# Altium footprint library PcbLib1.PcbLib: 335 footprints (part 20 of 22)
Each footprint in its own frame and in the unit in brackets; x right, y up, seen from the top. Pads: shape width x height; smd on the part's side, far side on the other; paste and mask are expansions set on the pad; w line width, h text height; cw(c..) or ccw(c..) is an arc to the next point about the centre after c.
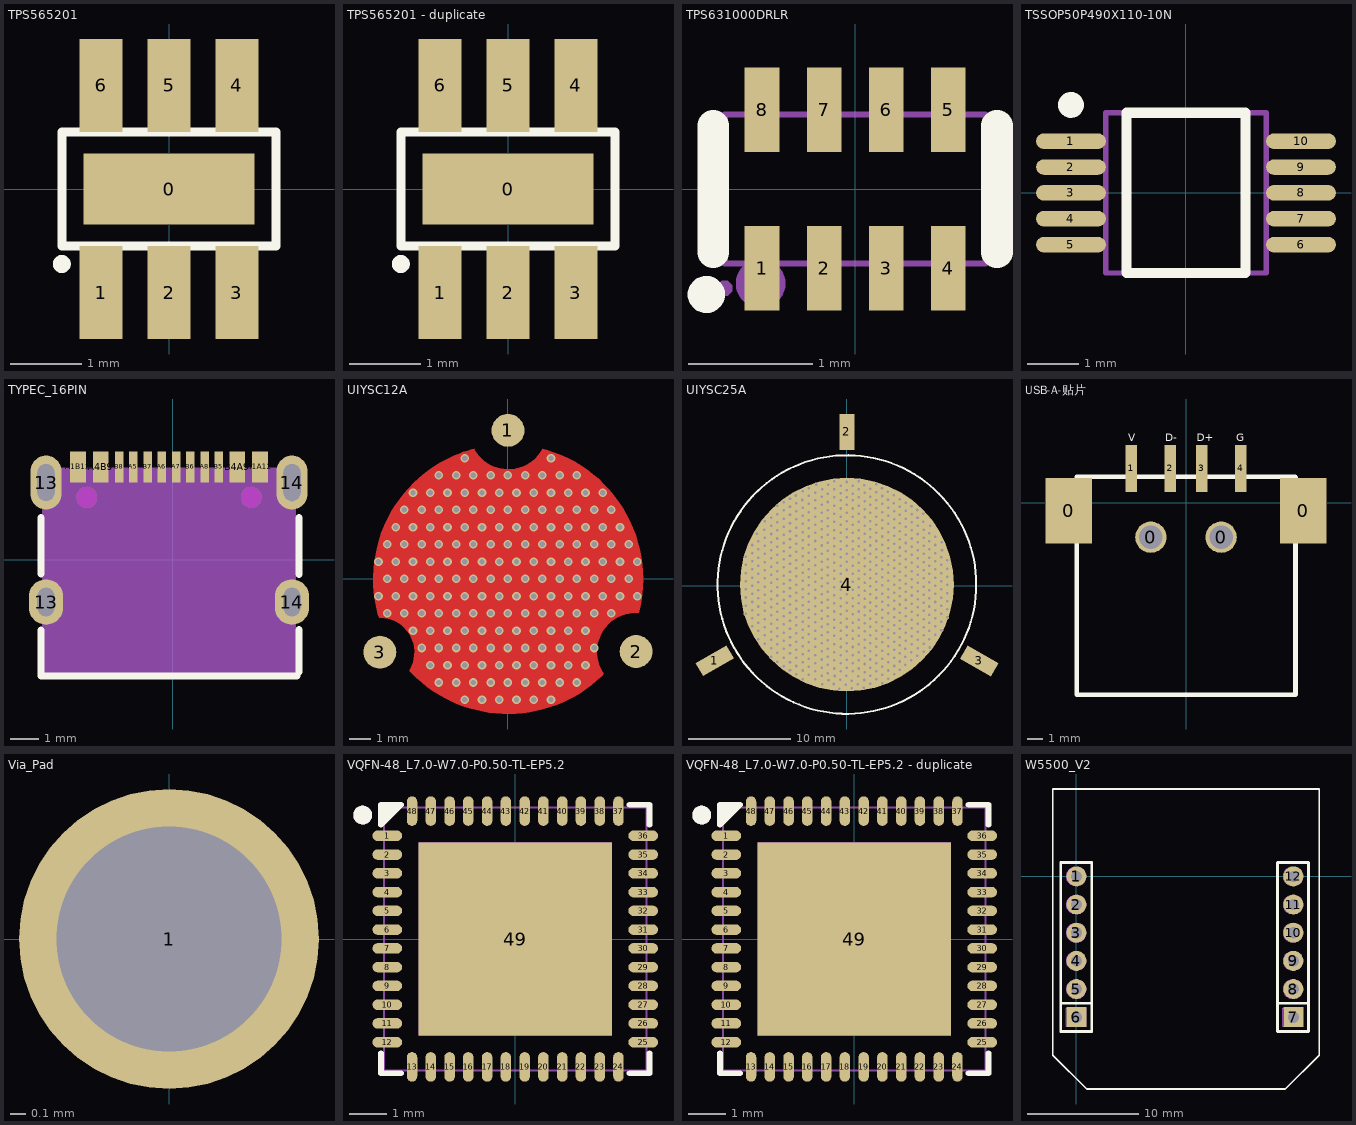
[diagram p19: the footprints below, top view; thin cyan lines are the x and y axes]

## TPS565201 [mm]
height 0.9
pads (7):
  rect 2.4x1 smd: 0(0,0)
  rect 0.6x1.3 smd: 1(-0.95,-1.45) 2(0,-1.45) 3(0.95,-1.45) 4(0.95,1.45) 5(0,1.45) 6(-0.95,1.45)
Top Overlay:
  circle w0.15: c-1.5,-1.05 r0.05
  lines w0.127: -1.5,-0.8 -1.5,0.8 1.5,0.8 1.5,-0.8 -1.5,-0.8

## TPS565201 - duplicate [mm]
height 0.9
pads (7):
  rect 2.4x1 smd: 0(0,0)
  rect 0.6x1.3 smd: 1(-0.95,-1.45) 2(0,-1.45) 3(0.95,-1.45) 4(0.95,1.45) 5(0,1.45) 6(-0.95,1.45)
Top Overlay:
  circle w0.15: c-1.5,-1.05 r0.05
  lines w0.127: -1.5,-0.8 -1.5,0.8 1.5,0.8 1.5,-0.8 -1.5,-0.8

## TPS631000DRLR [mm] "升降压DCDC"
pads (8):
  rect 0.28x0.68 smd: 1(-0.75,-0.64) 2(-0.25,-0.64) 3(0.25,-0.64) 4(0.75,-0.64) 5(0.75,0.64) 6(0.25,0.64) 7(-0.25,0.64) 8(-0.75,0.64)
Top Overlay:
  circle w0.15: c-1.2,-0.85 r0.075
  lines w0.254: -1.143,-0.508 -1.143,0.508 ; 1.143,-0.508 1.143,0.508
Mechanical 2:
  circle w0.2: c-0.762,-0.762 r0.1
Mechanical 6:
  lines w0.051: -1.05,-0.6 -1.05,0.6 1.05,0.6 1.05,-0.6 -1.05,-0.6
Mechanical 8:
  region: -0.99,-0.8 -0.99,-0.825 -1.025,-0.86 -1.075,-0.86 -1.11,-0.825 -1.11,-0.8 -1.11,-0.775 -1.075,-0.74 -1.025,-0.74 -0.99,-0.775 -0.99,-0.8
Mechanical 9:
  region: -0.64,-0.8 -0.64,-0.5 -0.86,-0.5 -0.86,-0.8
  region: -0.14,-0.8 -0.14,-0.5 -0.36,-0.5 -0.36,-0.8
  region: 0.36,-0.8 0.36,-0.5 0.14,-0.5 0.14,-0.8
  region: 0.86,-0.8 0.86,-0.5 0.64,-0.5 0.64,-0.8
  region: 0.86,0.8 0.86,0.5 0.64,0.5 0.64,0.8
  region: 0.36,0.8 0.36,0.5 0.14,0.5 0.14,0.8
  region: -0.14,0.8 -0.14,0.5 -0.36,0.5 -0.36,0.8
  region: -0.64,0.8 -0.64,0.5 -0.86,0.5 -0.86,0.8

## TSSOP50P490X110-10N [mm] "TSSOP, 10-Leads, Body 3.00x3.00mm, Pitch 0.50mm, IPC Medium Density"
height 1.1
pads (10):
  oval 1.35x0.3 smd: 1(-2.225,1) 2(-2.225,0.5) 3(-2.225,0) 4(-2.225,-0.5) 5(-2.225,-1) 6(2.225,-1) 7(2.225,-0.5) 8(2.225,0) 9(2.225,0.5) 10(2.225,1)
Top Overlay:
  circle w0.25: c-2.225,1.7 r0.125
  lines w0.2: -1.15,-1.55 1.15,-1.55 1.15,1.55 -1.15,1.55 -1.15,-1.55
Mechanical 13:
  lines w0.1: -1.55,-1.55 1.55,-1.55 1.55,1.55 -1.55,1.55 -1.55,-1.55
3D body: height 1.1, standoff 0.05, extent -1.55,-1.55 1.55,1.55

## TYPEC_16PIN [mm]
pads (16):
  oval 1.2x1.6 hole 0.6 slot 1 at 90 deg paste-2539.97 mask+0.05: 13(-4.452,-1.486) 14(4.198,-1.486)
  oval 1.1x1.9 hole 0.6 slot 1.3 at 90 deg paste-2539.97 mask+0.05: 13(-4.452,2.714) 14(4.198,2.714)
  rect 0.55x1.1 smd paste+0 mask+0.05: A1B12(-3.327,3.264) A4B9(-2.527,3.264) B1A12(3.073,3.264) B4A9(2.273,3.264)
  rect 0.3x1.1 smd paste+0 mask+0.05: A5(-1.377,3.264) A6(-0.377,3.264) A7(0.123,3.264) A8(1.123,3.264) B5(1.623,3.264) B6(0.623,3.264) B7(-0.877,3.264) B8(-1.877,3.264)
Top Overlay:
  lines w0.254: -4.627,-2.467 -4.627,-4.086 4.373,-4.086 ; -4.627,-0.505 -4.627,1.483 ; 4.445,-3.937 4.445,-2.464 ; 4.445,-0.508 4.445,1.486
Keep-Out Layer:
  board cut-out: 3.113,2.194 3.113,2.124 3.06,1.996 2.961,1.897 2.833,1.844 2.694,1.844 2.565,1.897 2.466,1.996 2.413,2.124 2.413,2.194 2.413,2.264 2.466,2.392 2.565,2.491 2.694,2.544 2.833,2.544 2.961,2.491 3.06,2.392 3.113,2.264 3.113,2.194
  board cut-out: -2.667,2.194 -2.667,2.124 -2.72,1.996 -2.819,1.897 -2.947,1.844 -3.087,1.844 -3.215,1.897 -3.314,1.996 -3.367,2.124 -3.367,2.194 -3.367,2.264 -3.314,2.392 -3.215,2.491 -3.087,2.544 -2.947,2.544 -2.819,2.491 -2.72,2.392 -2.667,2.264 -2.667,2.194
Keep-Out Layer:
  circle w0.003: c2.763,2.194 r0.35
  circle w0.003: c-3.017,2.194 r0.35
  region: 3.113,2.194 3.104,2.116 3.078,2.042 3.037,1.976 2.981,1.92 2.915,1.879 2.841,1.853 2.763,1.844 2.685,1.853 2.611,1.879 2.545,1.92 2.489,1.976 2.448,2.042 2.422,2.116 2.413,2.194 2.422,2.272 2.448,2.346 2.489,2.412 2.545,2.468 2.611,2.509 2.685,2.535 2.763,2.544 2.841,2.535 2.915,2.509 2.981,2.468 3.037,2.412 3.078,2.346 3.104,2.272
  region: 3.113,2.194 3.113,2.124 3.06,1.996 2.961,1.897 2.833,1.844 2.694,1.844 2.565,1.897 2.466,1.996 2.413,2.124 2.413,2.194 2.413,2.264 2.466,2.392 2.565,2.491 2.694,2.544 2.833,2.544 2.961,2.491 3.06,2.392 3.113,2.264 3.113,2.194
  region: -2.667,2.194 -2.676,2.116 -2.702,2.042 -2.743,1.976 -2.799,1.92 -2.865,1.879 -2.939,1.853 -3.017,1.844 -3.095,1.853 -3.169,1.879 -3.235,1.92 -3.291,1.976 -3.332,2.042 -3.358,2.116 -3.367,2.194 -3.358,2.272 -3.332,2.346 -3.291,2.412 -3.235,2.468 -3.169,2.509 -3.095,2.535 -3.017,2.544 -2.939,2.535 -2.865,2.509 -2.799,2.468 -2.743,2.412 -2.702,2.346 -2.676,2.272
  region: -2.667,2.194 -2.667,2.124 -2.72,1.996 -2.819,1.897 -2.947,1.844 -3.087,1.844 -3.215,1.897 -3.314,1.996 -3.367,2.124 -3.367,2.194 -3.367,2.264 -3.314,2.392 -3.215,2.491 -3.087,2.544 -2.947,2.544 -2.819,2.491 -2.72,2.392 -2.667,2.264 -2.667,2.194
Mechanical 1:
  circle w0.003: c2.763,2.194 r0.35
  circle w0.003: c-3.017,2.194 r0.35
Mechanical 5:
  circle w0.25: c2.763,2.194 r0.125
  circle w0.25: c-3.017,2.194 r0.125
Mechanical 9:
  region: -4.577,-4.112 -4.577,3.238 4.323,3.238 4.323,-4.112
Mechanical 11:
  region: -4.547,3.538 -4.547,3.526 -4.565,3.508 -4.589,3.508 -4.607,3.526 -4.607,3.538 -4.607,3.551 -4.589,3.568 -4.565,3.568 -4.547,3.551 -4.547,3.538
Mechanical 12:
  region: -4.602,-1.086 -4.302,-1.086 -4.302,-1.886 -4.602,-1.886
  region: 4.048,-1.086 4.348,-1.086 4.348,-1.886 4.048,-1.886
  region: 4.048,3.264 4.348,3.264 4.348,2.164 4.048,2.164
  region: -4.577,3.238 -4.327,3.238 -4.327,2.138 -4.577,2.138
  region: 2.873,3.538 3.273,3.538 3.273,2.688 2.873,2.688
  region: 2.073,3.538 2.473,3.538 2.473,2.688 2.073,2.688
  region: -2.727,3.538 -2.327,3.538 -2.327,2.688 -2.727,2.688
  region: -3.527,3.538 -3.127,3.538 -3.127,2.688 -3.527,2.688
  region: 1.523,3.538 1.723,3.538 1.723,2.688 1.523,2.688
  region: 1.023,3.538 1.223,3.538 1.223,2.688 1.023,2.688
  region: 0.523,3.538 0.723,3.538 0.723,2.688 0.523,2.688
  region: 0.023,3.538 0.223,3.538 0.223,2.688 0.023,2.688
  region: -0.477,3.538 -0.277,3.538 -0.277,2.688 -0.477,2.688
  region: -1.477,3.538 -1.277,3.538 -1.277,2.688 -1.477,2.688
  region: -0.977,3.538 -0.777,3.538 -0.777,2.688 -0.977,2.688
  region: -1.977,3.538 -1.777,3.538 -1.777,2.688 -1.977,2.688

## UIYSC12A [mil] "环行器"
pads (4):
  round 60 smd: 1(0.24,271) 2(234.04,-132.51) 3(-233.56,-133.71)
  round 1 smd: 4(0,0)
via 173.23,157.48 diameter 15.75 hole 9.84
via -78.74,220.47 diameter 15.75 hole 9.84
via 94.49,188.98 diameter 15.75 hole 9.84
via 62.99,188.98 diameter 15.75 hole 9.84
via -125.98,188.98 diameter 15.75 hole 9.84
via -94.49,188.98 diameter 15.75 hole 9.84
via -62.99,188.98 diameter 15.75 hole 9.84
via -31.5,188.98 diameter 15.75 hole 9.84
via 125.98,188.98 diameter 15.75 hole 9.84
via 78.74,220.47 diameter 15.75 hole 9.84
via 31.5,188.98 diameter 15.75 hole 9.84
via 0,188.98 diameter 15.75 hole 9.84
via 78.74,-220.47 diameter 15.75 hole 9.84
via -78.74,-220.47 diameter 15.75 hole 9.84
via -47.24,-220.47 diameter 15.75 hole 9.84
via -15.75,-220.47 diameter 15.75 hole 9.84
via 47.24,-220.47 diameter 15.75 hole 9.84
via 15.75,-220.47 diameter 15.75 hole 9.84
via -125.98,-188.98 diameter 15.75 hole 9.84
via -94.49,-188.98 diameter 15.75 hole 9.84
via -62.99,-188.98 diameter 15.75 hole 9.84
via -31.5,-188.98 diameter 15.75 hole 9.84
via 125.98,-188.98 diameter 15.75 hole 9.84
via 110.24,-157.48 diameter 15.75 hole 9.84
via 78.74,-157.48 diameter 15.75 hole 9.84
via 31.5,-188.98 diameter 15.75 hole 9.84
via 0,-188.98 diameter 15.75 hole 9.84
via -141.73,-157.48 diameter 15.75 hole 9.84
via -110.24,-157.48 diameter 15.75 hole 9.84
via -78.74,-157.48 diameter 15.75 hole 9.84
via -47.24,-157.48 diameter 15.75 hole 9.84
via -15.75,-157.48 diameter 15.75 hole 9.84
via 141.73,-157.48 diameter 15.75 hole 9.84
via 94.49,-188.98 diameter 15.75 hole 9.84
via 62.99,-188.98 diameter 15.75 hole 9.84
via 47.24,-157.48 diameter 15.75 hole 9.84
via 15.75,-157.48 diameter 15.75 hole 9.84
via 94.49,-125.98 diameter 15.75 hole 9.84
via 62.99,-125.98 diameter 15.75 hole 9.84
via -157.48,-125.98 diameter 15.75 hole 9.84
via -125.98,-125.98 diameter 15.75 hole 9.84
via -94.49,-125.98 diameter 15.75 hole 9.84
via -62.99,-125.98 diameter 15.75 hole 9.84
via -31.5,-125.98 diameter 15.75 hole 9.84
via 157.48,-125.98 diameter 15.75 hole 9.84
via 125.98,-125.98 diameter 15.75 hole 9.84
via 31.5,-125.98 diameter 15.75 hole 9.84
via 0,-125.98 diameter 15.75 hole 9.84
via -220.47,-62.99 diameter 15.75 hole 9.84
via -188.98,-62.99 diameter 15.75 hole 9.84
via -173.23,-94.49 diameter 15.75 hole 9.84
via -141.73,-94.49 diameter 15.75 hole 9.84
via -110.24,-94.49 diameter 15.75 hole 9.84
via -78.74,-94.49 diameter 15.75 hole 9.84
via -47.24,-94.49 diameter 15.75 hole 9.84
via 188.98,-62.99 diameter 15.75 hole 9.84
via 141.73,-94.49 diameter 15.75 hole 9.84
via 110.24,-94.49 diameter 15.75 hole 9.84
via 94.49,-62.99 diameter 15.75 hole 9.84
via 62.99,-62.99 diameter 15.75 hole 9.84
via 15.75,-94.49 diameter 15.75 hole 9.84
via -15.75,-94.49 diameter 15.75 hole 9.84
via -157.48,-62.99 diameter 15.75 hole 9.84
via -125.98,-62.99 diameter 15.75 hole 9.84
via -94.49,-62.99 diameter 15.75 hole 9.84
via -62.99,-62.99 diameter 15.75 hole 9.84
via -31.5,-62.99 diameter 15.75 hole 9.84
via 157.48,-62.99 diameter 15.75 hole 9.84
via 125.98,-62.99 diameter 15.75 hole 9.84
via 78.74,-94.49 diameter 15.75 hole 9.84
via 47.24,-94.49 diameter 15.75 hole 9.84
via 31.5,-62.99 diameter 15.75 hole 9.84
via 0,-62.99 diameter 15.75 hole 9.84
via -173.23,157.48 diameter 15.75 hole 9.84
via 110.24,157.48 diameter 15.75 hole 9.84
via 78.74,157.48 diameter 15.75 hole 9.84
via -141.73,157.48 diameter 15.75 hole 9.84
via -110.24,157.48 diameter 15.75 hole 9.84
via -78.74,157.48 diameter 15.75 hole 9.84
via -47.24,157.48 diameter 15.75 hole 9.84
via -15.75,157.48 diameter 15.75 hole 9.84
via 141.73,157.48 diameter 15.75 hole 9.84
via 47.24,157.48 diameter 15.75 hole 9.84
via 15.75,157.48 diameter 15.75 hole 9.84
via -204.72,94.49 diameter 15.75 hole 9.84
via -173.23,94.49 diameter 15.75 hole 9.84
via -157.48,125.98 diameter 15.75 hole 9.84
via -125.98,125.98 diameter 15.75 hole 9.84
via -94.49,125.98 diameter 15.75 hole 9.84
via -62.99,125.98 diameter 15.75 hole 9.84
via -31.5,125.98 diameter 15.75 hole 9.84
via 204.72,94.49 diameter 15.75 hole 9.84
via 157.48,125.98 diameter 15.75 hole 9.84
via 125.98,125.98 diameter 15.75 hole 9.84
via 110.24,94.49 diameter 15.75 hole 9.84
via 78.74,94.49 diameter 15.75 hole 9.84
via 31.5,125.98 diameter 15.75 hole 9.84
via 0,125.98 diameter 15.75 hole 9.84
via -188.98,125.98 diameter 15.75 hole 9.84
via -141.73,94.49 diameter 15.75 hole 9.84
via -110.24,94.49 diameter 15.75 hole 9.84
via -78.74,94.49 diameter 15.75 hole 9.84
via -47.24,94.49 diameter 15.75 hole 9.84
via -15.75,94.49 diameter 15.75 hole 9.84
via 188.98,125.98 diameter 15.75 hole 9.84
via 173.23,94.49 diameter 15.75 hole 9.84
via 141.73,94.49 diameter 15.75 hole 9.84
via 94.49,125.98 diameter 15.75 hole 9.84
via 62.99,125.98 diameter 15.75 hole 9.84
via 47.24,94.49 diameter 15.75 hole 9.84
via 15.75,94.49 diameter 15.75 hole 9.84
via -157.48,62.99 diameter 15.75 hole 9.84
via -125.98,62.99 diameter 15.75 hole 9.84
via -94.49,62.99 diameter 15.75 hole 9.84
via -62.99,62.99 diameter 15.75 hole 9.84
via -31.5,62.99 diameter 15.75 hole 9.84
via 157.48,62.99 diameter 15.75 hole 9.84
via 125.98,62.99 diameter 15.75 hole 9.84
via 31.5,62.99 diameter 15.75 hole 9.84
via 0,62.99 diameter 15.75 hole 9.84
via -220.47,62.99 diameter 15.75 hole 9.84
via -188.98,62.99 diameter 15.75 hole 9.84
via 220.47,62.99 diameter 15.75 hole 9.84
via 188.98,62.99 diameter 15.75 hole 9.84
via 94.49,62.99 diameter 15.75 hole 9.84
via 62.99,62.99 diameter 15.75 hole 9.84
via -236.22,-31.5 diameter 15.75 hole 9.84
via -204.72,-31.5 diameter 15.75 hole 9.84
via -173.23,-31.5 diameter 15.75 hole 9.84
via 236.22,-31.5 diameter 15.75 hole 9.84
via 204.72,-31.5 diameter 15.75 hole 9.84
via 110.24,-31.5 diameter 15.75 hole 9.84
via 78.74,-31.5 diameter 15.75 hole 9.84
via -141.73,-31.5 diameter 15.75 hole 9.84
via -110.24,-31.5 diameter 15.75 hole 9.84
via -78.74,-31.5 diameter 15.75 hole 9.84
via -47.24,-31.5 diameter 15.75 hole 9.84
via -15.75,-31.5 diameter 15.75 hole 9.84
via 173.23,-31.5 diameter 15.75 hole 9.84
via 141.73,-31.5 diameter 15.75 hole 9.84
via 47.24,-31.5 diameter 15.75 hole 9.84
via 15.75,-31.5 diameter 15.75 hole 9.84
via -236.22,31.5 diameter 15.75 hole 9.84
via -204.72,31.5 diameter 15.75 hole 9.84
via -173.23,31.5 diameter 15.75 hole 9.84
via -157.48,0 diameter 15.75 hole 9.84
via -125.98,0 diameter 15.75 hole 9.84
via -94.49,0 diameter 15.75 hole 9.84
via -62.99,0 diameter 15.75 hole 9.84
via -31.5,0 diameter 15.75 hole 9.84
via 236.22,31.5 diameter 15.75 hole 9.84
via 204.72,31.5 diameter 15.75 hole 9.84
via 157.48,0 diameter 15.75 hole 9.84
via 125.98,0 diameter 15.75 hole 9.84
via 110.24,31.5 diameter 15.75 hole 9.84
via 78.74,31.5 diameter 15.75 hole 9.84
via 31.5,0 diameter 15.75 hole 9.84
via 0,0 diameter 15.75 hole 9.84
via -220.47,0 diameter 15.75 hole 9.84
via -188.98,0 diameter 15.75 hole 9.84
via -141.73,31.5 diameter 15.75 hole 9.84
via -110.24,31.5 diameter 15.75 hole 9.84
via -78.74,31.5 diameter 15.75 hole 9.84
via -47.24,31.5 diameter 15.75 hole 9.84
via -15.75,31.5 diameter 15.75 hole 9.84
via 220.47,0 diameter 15.75 hole 9.84
via 188.98,0 diameter 15.75 hole 9.84
via 173.23,31.5 diameter 15.75 hole 9.84
via 141.73,31.5 diameter 15.75 hole 9.84
via 94.49,0 diameter 15.75 hole 9.84
via 62.99,0 diameter 15.75 hole 9.84
via 47.24,31.5 diameter 15.75 hole 9.84
via 15.75,31.5 diameter 15.75 hole 9.84
Top Layer:
  region: 188 vertices and 0 holes, not listed, extent -245.61,-246.46 246.71,237.74
Top Paste:
  drawing of 1 lines, arcs and shapes, not listed
Top Solder:
  region: 26.42,285.58 27.87,283.06 29.74,277.55 30.5,271.78 30.12,265.98 28.61,260.36 26.04,255.14 22.5,250.53 18.13,246.69 15.61,245.24 13.09,243.79 7.58,241.92 1.82,241.16 -3.99,241.54 -9.61,243.04 -14.82,245.62 -19.44,249.16 -23.27,253.53 -24.73,256.05 -26.18,258.57 -28.05,264.07 -28.81,269.84 -28.43,275.64 -26.92,281.26 -24.35,286.48 -20.81,291.09 -16.44,294.93 -13.92,296.38 -11.4,297.84 -5.89,299.71 -0.13,300.47 5.68,300.09 11.3,298.58 16.51,296.01 21.13,292.47 24.96,288.09
  region: -207.66,-119.15 -206.2,-121.67 -204.33,-127.18 -203.57,-132.94 -203.96,-138.75 -205.46,-144.36 -208.03,-149.58 -211.57,-154.2 -215.95,-158.03 -218.47,-159.49 -220.98,-160.94 -226.49,-162.81 -232.26,-163.57 -238.06,-163.19 -243.68,-161.68 -248.9,-159.11 -253.51,-155.57 -257.35,-151.2 -258.8,-148.68 -260.26,-146.16 -262.12,-140.65 -262.88,-134.88 -262.5,-129.08 -261,-123.46 -258.43,-118.25 -254.88,-113.63 -250.51,-109.8 -247.99,-108.34 -245.47,-106.89 -239.97,-105.02 -234.2,-104.26 -228.4,-104.64 -222.78,-106.14 -217.56,-108.72 -212.95,-112.26 -209.11,-116.63
  region: 259.29,-117.77 260.74,-120.29 262.61,-125.8 263.37,-131.57 262.99,-137.37 261.49,-142.99 258.92,-148.21 255.37,-152.82 251,-156.66 248.48,-158.11 245.96,-159.56 240.46,-161.43 234.69,-162.19 228.89,-161.81 223.27,-160.31 218.05,-157.73 213.44,-154.19 209.6,-149.82 208.15,-147.3 206.69,-144.78 204.82,-139.28 204.06,-133.51 204.44,-127.7 205.95,-122.09 208.52,-116.87 212.06,-112.26 216.44,-108.42 218.96,-106.97 221.47,-105.51 226.98,-103.64 232.75,-102.88 238.55,-103.26 244.17,-104.77 249.39,-107.34 254,-110.88 257.84,-115.26

## UIYSC25A [mm] "环行器"
pads (4):
  rect 1.5x3.5 smd rot 120: 1(-12.97,-7.392)
  rect 1.5x3.5 smd: 2(0.007,15.085)
  rect 1.5x3.5 smd rot 60: 3(12.997,-7.4)
  round 21 smd mask+0: 4(0.007,0.1)
via 1.146,10.234 diameter 0.4 hole 0.25
via 2.871,9.936 diameter 0.4 hole 0.25
via 1.725,9.874 diameter 0.4 hole 0.25
via 0.579,9.813 diameter 0.4 hole 0.25
via -1.242,10.254 diameter 0.4 hole 0.25
via 0,10.172 diameter 0.4 hole 0.25
via -3.029,9.911 diameter 0.4 hole 0.25
via -1.827,9.893 diameter 0.4 hole 0.25
via -0.621,9.813 diameter 0.4 hole 0.25
via -5.586,8.54 diameter 0.4 hole 0.25
via -5.006,8.847 diameter 0.4 hole 0.25
via 1.661,-10.049 diameter 0.4 hole 0.25
via 0.463,-10.102 diameter 0.4 hole 0.25
via -0.734,-10.155 diameter 0.4 hole 0.25
via 6.347,7.781 diameter 0.4 hole 0.25
via 6.927,7.422 diameter 0.4 hole 0.25
via -9.931,-2.774 diameter 0.4 hole 0.25
via -9.931,-1.974 diameter 0.4 hole 0.25
via -9.931,-1.174 diameter 0.4 hole 0.25
via -9.931,-0.374 diameter 0.4 hole 0.25
via -9.931,0.426 diameter 0.4 hole 0.25
via -8.852,5.086 diameter 0.4 hole 0.25
via -8.069,6.303 diameter 0.4 hole 0.25
via -7.448,6.663 diameter 0.4 hole 0.25
via -6.828,7.822 diameter 0.4 hole 0.25
via -6.828,7.022 diameter 0.4 hole 0.25
via -6.207,8.181 diameter 0.4 hole 0.25
via -9.931,1.226 diameter 0.4 hole 0.25
via -9.931,2.026 diameter 0.4 hole 0.25
via -9.931,2.826 diameter 0.4 hole 0.25
via -5.584,-8.313 diameter 0.4 hole 0.25
via -4.966,-8.701 diameter 0.4 hole 0.25
via -6.201,-7.926 diameter 0.4 hole 0.25
via -6.822,-7.485 diameter 0.4 hole 0.25
via -8.69,-5.256 diameter 0.4 hole 0.25
via -8.069,-5.697 diameter 0.4 hole 0.25
via -7.446,-6.991 diameter 0.4 hole 0.25
via 9.848,-2.333 diameter 0.4 hole 0.25
via 9.848,2.467 diameter 0.4 hole 0.25
via 9.848,-0.733 diameter 0.4 hole 0.25
via 9.848,0.067 diameter 0.4 hole 0.25
via 9.848,0.867 diameter 0.4 hole 0.25
via 9.848,1.667 diameter 0.4 hole 0.25
via 9.848,-1.533 diameter 0.4 hole 0.25
via 9.848,-3.133 diameter 0.4 hole 0.25
via 8.174,5.877 diameter 0.4 hole 0.25
via 7.506,7.063 diameter 0.4 hole 0.25
via 5.768,8.14 diameter 0.4 hole 0.25
via 6.334,-7.35 diameter 0.4 hole 0.25
via 2.278,-9.636 diameter 0.4 hole 0.25
via 8.149,-6.084 diameter 0.4 hole 0.25
via 9.269,-4.374 diameter 0.4 hole 0.25
via 6.913,-6.909 diameter 0.4 hole 0.25
via 7.531,-6.497 diameter 0.4 hole 0.25
via -2.42,-9.71 diameter 0.4 hole 0.25
via -1.275,-9.671 diameter 0.4 hole 0.25
via 1.081,-9.689 diameter 0.4 hole 0.25
via -0.116,-9.743 diameter 0.4 hole 0.25
via 2.317,-7.264 diameter 0.4 hole 0.25
via 7.519,6.283 diameter 0.4 hole 0.25
via 7.531,5.503 diameter 0.4 hole 0.25
via 9.335,4.244 diameter 0.4 hole 0.25
via 9.344,3.483 diameter 0.4 hole 0.25
via 9.292,2.773 diameter 0.4 hole 0.25
via 9.269,2.026 diameter 0.4 hole 0.25
via 9.269,1.226 diameter 0.4 hole 0.25
via 9.269,0.426 diameter 0.4 hole 0.25
via 9.269,-0.374 diameter 0.4 hole 0.25
via 9.277,-1.179 diameter 0.4 hole 0.25
via 9.269,-1.974 diameter 0.4 hole 0.25
via 7.531,0.703 diameter 0.4 hole 0.25
via 8.69,-2.415 diameter 0.4 hole 0.25
via 6.36,7.001 diameter 0.4 hole 0.25
via 5.793,6.581 diameter 0.4 hole 0.25
via 5.781,7.36 diameter 0.4 hole 0.25
via 5.214,6.94 diameter 0.4 hole 0.25
via 5.201,7.72 diameter 0.4 hole 0.25
via 2.896,1.977 diameter 0.4 hole 0.25
via 5.214,-2.66 diameter 0.4 hole 0.25
via 5.214,-1.86 diameter 0.4 hole 0.25
via 1.738,5.095 diameter 0.4 hole 0.25
via 4.634,-4.701 diameter 0.4 hole 0.25
via 4.634,-0.701 diameter 0.4 hole 0.25
via 1.738,6.695 diameter 0.4 hole 0.25
via 2.896,2.777 diameter 0.4 hole 0.25
via 4.634,-5.501 diameter 0.4 hole 0.25
via 5.214,-1.06 diameter 0.4 hole 0.25
via 1.738,5.895 diameter 0.4 hole 0.25
via 2.317,2.336 diameter 0.4 hole 0.25
via 1.158,-8.146 diameter 0.4 hole 0.25
via -0.621,1.967 diameter 0.4 hole 0.25
via 6.952,-0.537 diameter 0.4 hole 0.25
via 2.317,-5.664 diameter 0.4 hole 0.25
via 1.158,2.254 diameter 0.4 hole 0.25
via 1.738,-4.505 diameter 0.4 hole 0.25
via 2.896,-2.823 diameter 0.4 hole 0.25
via 1.158,-0.146 diameter 0.4 hole 0.25
via 4.055,3.658 diameter 0.4 hole 0.25
via 1.738,-3.705 diameter 0.4 hole 0.25
via 2.317,-2.464 diameter 0.4 hole 0.25
via 4.055,5.258 diameter 0.4 hole 0.25
via 8.69,3.985 diameter 0.4 hole 0.25
via 0.579,-2.833 diameter 0.4 hole 0.25
via 0.579,0.367 diameter 0.4 hole 0.25
via -4.345,7.658 diameter 0.4 hole 0.25
via 0.001,7.93 diameter 0.4 hole 0.25
via 8.11,5.144 diameter 0.4 hole 0.25
via 1.158,-3.346 diameter 0.4 hole 0.25
via 1.158,0.654 diameter 0.4 hole 0.25
via -4.345,6.858 diameter 0.4 hole 0.25
via 0.579,6.767 diameter 0.4 hole 0.25
via 8.69,4.785 diameter 0.4 hole 0.25
via 0.579,-3.633 diameter 0.4 hole 0.25
via 0.579,1.167 diameter 0.4 hole 0.25
via -4.345,6.058 diameter 0.4 hole 0.25
via 6.372,-4.978 diameter 0.4 hole 0.25
via 0.001,7.13 diameter 0.4 hole 0.25
via 7.531,-4.097 diameter 0.4 hole 0.25
via -0.621,5.167 diameter 0.4 hole 0.25
via 7.531,4.703 diameter 0.4 hole 0.25
via 0.579,-1.233 diameter 0.4 hole 0.25
via 6.952,-5.337 diameter 0.4 hole 0.25
via -1.862,5.006 diameter 0.4 hole 0.25
via 7.531,-1.697 diameter 0.4 hole 0.25
via 1.158,-1.746 diameter 0.4 hole 0.25
via 7.531,-5.697 diameter 0.4 hole 0.25
via -4.345,2.058 diameter 0.4 hole 0.25
via -1.242,4.654 diameter 0.4 hole 0.25
via 8.11,3.544 diameter 0.4 hole 0.25
via 0.579,-2.033 diameter 0.4 hole 0.25
via 8.11,4.344 diameter 0.4 hole 0.25
via 1.158,-2.546 diameter 0.4 hole 0.25
via 6.952,-6.137 diameter 0.4 hole 0.25
via -4.385,8.406 diameter 0.4 hole 0.25
via -0.621,4.367 diameter 0.4 hole 0.25
via 1.699,-9.277 diameter 0.4 hole 0.25
via -5.586,7.74 diameter 0.4 hole 0.25
via -2.483,1.536 diameter 0.4 hole 0.25
via 4.634,4.899 diameter 0.4 hole 0.25
via 6.952,-1.337 diameter 0.4 hole 0.25
via 0.579,-5.233 diameter 0.4 hole 0.25
via -0.621,3.567 diameter 0.4 hole 0.25
via -5.586,6.14 diameter 0.4 hole 0.25
via -4.345,9.258 diameter 0.4 hole 0.25
via 6.372,-4.178 diameter 0.4 hole 0.25
via 0.001,3.93 diameter 0.4 hole 0.25
via -6.207,7.381 diameter 0.4 hole 0.25
via -0.621,1.167 diameter 0.4 hole 0.25
via 5.214,4.54 diameter 0.4 hole 0.25
via 3.476,-7.983 diameter 0.4 hole 0.25
via -6.828,6.222 diameter 0.4 hole 0.25
via 1.158,7.854 diameter 0.4 hole 0.25
via 6.952,5.063 diameter 0.4 hole 0.25
via -1.242,3.854 diameter 0.4 hole 0.25
via 1.158,-0.946 diameter 0.4 hole 0.25
via -5.586,5.34 diameter 0.4 hole 0.25
via -3.738,9.541 diameter 0.4 hole 0.25
via 6.372,-2.578 diameter 0.4 hole 0.25
via 0.579,3.567 diameter 0.4 hole 0.25
via 0.579,-6.833 diameter 0.4 hole 0.25
via 6.952,4.263 diameter 0.4 hole 0.25
via -2.483,3.936 diameter 0.4 hole 0.25
via -5.586,4.54 diameter 0.4 hole 0.25
via 5.793,-4.619 diameter 0.4 hole 0.25
via 0.001,6.33 diameter 0.4 hole 0.25
via 8.11,2.744 diameter 0.4 hole 0.25
via 1.158,-4.146 diameter 0.4 hole 0.25
via 0.001,1.53 diameter 0.4 hole 0.25
via -5.586,2.94 diameter 0.4 hole 0.25
via -3.724,8.817 diameter 0.4 hole 0.25
via 5.793,-3.019 diameter 0.4 hole 0.25
via 0.579,5.967 diameter 0.4 hole 0.25
via -5.586,3.74 diameter 0.4 hole 0.25
via 5.793,-2.219 diameter 0.4 hole 0.25
via 0.001,5.53 diameter 0.4 hole 0.25
via -0.039,-8.846 diameter 0.4 hole 0.25
via -2.483,7.936 diameter 0.4 hole 0.25
via -2.408,9.47 diameter 0.4 hole 0.25
via 4.634,-7.901 diameter 0.4 hole 0.25
via -5.586,2.14 diameter 0.4 hole 0.25
via 3.476,0.017 diameter 0.4 hole 0.25
via 8.69,2.385 diameter 0.4 hole 0.25
via 1.158,-4.946 diameter 0.4 hole 0.25
via 0.001,0.73 diameter 0.4 hole 0.25
via -6.207,5.781 diameter 0.4 hole 0.25
via -3.117,9.1 diameter 0.4 hole 0.25
via 5.793,-3.819 diameter 0.4 hole 0.25
via 0.579,4.367 diameter 0.4 hole 0.25
via 0.579,5.167 diameter 0.4 hole 0.25
via 6.372,-3.378 diameter 0.4 hole 0.25
via -6.207,4.981 diameter 0.4 hole 0.25
via 0.001,2.33 diameter 0.4 hole 0.25
via 0.579,-4.433 diameter 0.4 hole 0.25
via 8.69,3.185 diameter 0.4 hole 0.25
via 0.579,-6.033 diameter 0.4 hole 0.25
via -1.242,3.054 diameter 0.4 hole 0.25
via 6.952,0.263 diameter 0.4 hole 0.25
via -6.207,4.181 diameter 0.4 hole 0.25
via -1.242,8.654 diameter 0.4 hole 0.25
via 5.793,-5.419 diameter 0.4 hole 0.25
via 0.001,4.73 diameter 0.4 hole 0.25
via 8.11,1.944 diameter 0.4 hole 0.25
via -3.724,2.417 diameter 0.4 hole 0.25
via 0.001,-4.87 diameter 0.4 hole 0.25
via 8.11,-5.256 diameter 0.4 hole 0.25
via -6.207,1.781 diameter 0.4 hole 0.25
via 4.634,0.099 diameter 0.4 hole 0.25
via -6.207,2.581 diameter 0.4 hole 0.25
via 2.317,-4.864 diameter 0.4 hole 0.25
via 0.579,1.967 diameter 0.4 hole 0.25
via 1.158,-7.346 diameter 0.4 hole 0.25
via -1.862,2.606 diameter 0.4 hole 0.25
via 6.952,2.663 diameter 0.4 hole 0.25
via 1.158,-6.546 diameter 0.4 hole 0.25
via 6.952,1.063 diameter 0.4 hole 0.25
via -0.621,2.767 diameter 0.4 hole 0.25
via 2.896,-6.823 diameter 0.4 hole 0.25
via -6.207,3.381 diameter 0.4 hole 0.25
via -2.483,8.736 diameter 0.4 hole 0.25
via 0.001,3.13 diameter 0.4 hole 0.25
via 4.055,-5.942 diameter 0.4 hole 0.25
via -6.828,3.822 diameter 0.4 hole 0.25
via 0.579,8.367 diameter 0.4 hole 0.25
via -6.828,2.222 diameter 0.4 hole 0.25
via 4.055,-5.142 diameter 0.4 hole 0.25
via 0.579,7.567 diameter 0.4 hole 0.25
via 2.317,-6.464 diameter 0.4 hole 0.25
via -7.448,5.063 diameter 0.4 hole 0.25
via 1.12,-8.918 diameter 0.4 hole 0.25
via -0.621,6.767 diameter 0.4 hole 0.25
via 2.896,6.777 diameter 0.4 hole 0.25
via 1.738,-6.105 diameter 0.4 hole 0.25
via -7.448,1.863 diameter 0.4 hole 0.25
via 2.896,-3.623 diameter 0.4 hole 0.25
via 2.317,-0.064 diameter 0.4 hole 0.25
via 4.055,7.658 diameter 0.4 hole 0.25
via 1.738,-8.505 diameter 0.4 hole 0.25
via -7.448,2.663 diameter 0.4 hole 0.25
via 2.896,-0.423 diameter 0.4 hole 0.25
via 4.634,-1.501 diameter 0.4 hole 0.25
via 1.738,8.295 diameter 0.4 hole 0.25
via 2.896,4.377 diameter 0.4 hole 0.25
via 0.579,-7.633 diameter 0.4 hole 0.25
via -1.242,2.254 diameter 0.4 hole 0.25
via 6.952,1.863 diameter 0.4 hole 0.25
via -8.069,4.703 diameter 0.4 hole 0.25
via 2.896,-5.223 diameter 0.4 hole 0.25
via 0.579,2.767 diameter 0.4 hole 0.25
via -8.069,2.303 diameter 0.4 hole 0.25
via 5.214,-5.06 diameter 0.4 hole 0.25
via 5.793,-0.619 diameter 0.4 hole 0.25
via 1.738,7.495 diameter 0.4 hole 0.25
via 2.896,3.577 diameter 0.4 hole 0.25
via -1.242,0.654 diameter 0.4 hole 0.25
via -1.862,0.206 diameter 0.4 hole 0.25
via -6.828,5.422 diameter 0.4 hole 0.25
via -3.104,1.177 diameter 0.4 hole 0.25
via -6.828,4.622 diameter 0.4 hole 0.25
via 3.476,-5.583 diameter 0.4 hole 0.25
via 7.531,1.503 diameter 0.4 hole 0.25
via -3.104,-0.423 diameter 0.4 hole 0.25
via 3.476,-7.183 diameter 0.4 hole 0.25
via 7.531,-2.497 diameter 0.4 hole 0.25
via -4.345,5.258 diameter 0.4 hole 0.25
via -1.242,6.254 diameter 0.4 hole 0.25
via 7.531,-0.097 diameter 0.4 hole 0.25
via -3.104,-1.223 diameter 0.4 hole 0.25
via 4.055,-7.542 diameter 0.4 hole 0.25
via -4.345,4.458 diameter 0.4 hole 0.25
via -1.862,5.806 diameter 0.4 hole 0.25
via 6.952,-2.937 diameter 0.4 hole 0.25
via 7.531,2.303 diameter 0.4 hole 0.25
via -3.104,-2.023 diameter 0.4 hole 0.25
via 4.055,-6.742 diameter 0.4 hole 0.25
via -2.483,6.336 diameter 0.4 hole 0.25
via -3.724,0.017 diameter 0.4 hole 0.25
via 3.476,-4.783 diameter 0.4 hole 0.25
via -4.345,0.458 diameter 0.4 hole 0.25
via -3.724,-0.783 diameter 0.4 hole 0.25
via -1.242,-2.546 diameter 0.4 hole 0.25
via 4.055,-1.142 diameter 0.4 hole 0.25
via -1.242,-3.346 diameter 0.4 hole 0.25
via -4.345,1.258 diameter 0.4 hole 0.25
via -3.724,-1.583 diameter 0.4 hole 0.25
via 6.372,3.022 diameter 0.4 hole 0.25
via -8.069,3.903 diameter 0.4 hole 0.25
via -1.242,-4.146 diameter 0.4 hole 0.25
via 1.158,4.654 diameter 0.4 hole 0.25
via -1.862,-5.394 diameter 0.4 hole 0.25
via -3.104,1.977 diameter 0.4 hole 0.25
via -1.862,-6.194 diameter 0.4 hole 0.25
via -0.621,8.367 diameter 0.4 hole 0.25
via 8.69,-4.015 diameter 0.4 hole 0.25
via -7.448,3.463 diameter 0.4 hole 0.25
via -2.483,-4.864 diameter 0.4 hole 0.25
via 1.158,7.054 diameter 0.4 hole 0.25
via 8.11,-3.656 diameter 0.4 hole 0.25
via -7.448,4.263 diameter 0.4 hole 0.25
via -2.483,-4.064 diameter 0.4 hole 0.25
via 1.158,5.454 diameter 0.4 hole 0.25
via 7.531,3.103 diameter 0.4 hole 0.25
via -3.104,-2.823 diameter 0.4 hole 0.25
via 3.476,-6.383 diameter 0.4 hole 0.25
via -6.828,3.022 diameter 0.4 hole 0.25
via -0.621,5.967 diameter 0.4 hole 0.25
via 7.531,-0.897 diameter 0.4 hole 0.25
via -3.104,-3.623 diameter 0.4 hole 0.25
via 7.531,-3.297 diameter 0.4 hole 0.25
via 7.531,-4.897 diameter 0.4 hole 0.25
via -4.345,3.658 diameter 0.4 hole 0.25
via -2.483,5.536 diameter 0.4 hole 0.25
via -3.724,-5.583 diameter 0.4 hole 0.25
via -4.345,-1.942 diameter 0.4 hole 0.25
via 0.001,-3.27 diameter 0.4 hole 0.25
via 6.372,0.622 diameter 0.4 hole 0.25
via -4.345,-2.742 diameter 0.4 hole 0.25
via -3.724,-3.983 diameter 0.4 hole 0.25
via -1.862,-2.994 diameter 0.4 hole 0.25
via 4.055,-0.342 diameter 0.4 hole 0.25
via 3.476,-8.783 diameter 0.4 hole 0.25
via -5.586,-1.06 diameter 0.4 hole 0.25
via 4.055,1.258 diameter 0.4 hole 0.25
via -0.621,-7.633 diameter 0.4 hole 0.25
via 8.69,-0.015 diameter 0.4 hole 0.25
via -1.242,7.054 diameter 0.4 hole 0.25
via -0.62,9.063 diameter 0.4 hole 0.25
via -2.483,3.136 diameter 0.4 hole 0.25
via -0.621,-3.633 diameter 0.4 hole 0.25
via 9.269,-2.774 diameter 0.4 hole 0.25
via -5.586,0.54 diameter 0.4 hole 0.25
via 4.634,5.699 diameter 0.4 hole 0.25
via 8.11,0.344 diameter 0.4 hole 0.25
via -3.104,2.777 diameter 0.4 hole 0.25
via -0.621,-4.433 diameter 0.4 hole 0.25
via 8.69,-4.815 diameter 0.4 hole 0.25
via -5.586,1.34 diameter 0.4 hole 0.25
via 3.476,2.417 diameter 0.4 hole 0.25
via 0.001,-6.47 diameter 0.4 hole 0.25
via 8.69,1.585 diameter 0.4 hole 0.25
via -1.862,8.206 diameter 0.4 hole 0.25
via 3.476,-9.583 diameter 0.4 hole 0.25
via -5.586,-0.26 diameter 0.4 hole 0.25
via 4.055,2.058 diameter 0.4 hole 0.25
via 4.634,-6.301 diameter 0.4 hole 0.25
via 6.952,5.863 diameter 0.4 hole 0.25
via -5.586,-2.66 diameter 0.4 hole 0.25
via 1.738,0.295 diameter 0.4 hole 0.25
via 2.896,0.377 diameter 0.4 hole 0.25
via -6.207,-1.419 diameter 0.4 hole 0.25
via 4.634,0.899 diameter 0.4 hole 0.25
via 0.001,-8.07 diameter 0.4 hole 0.25
via 8.11,-0.456 diameter 0.4 hole 0.25
via -1.862,6.606 diameter 0.4 hole 0.25
via 0,9.372 diameter 0.4 hole 0.25
via -0.621,-6.833 diameter 0.4 hole 0.25
via 8.11,1.144 diameter 0.4 hole 0.25
via -1.862,7.406 diameter 0.4 hole 0.25
via 2.896,-9.223 diameter 0.4 hole 0.25
via -6.207,-0.619 diameter 0.4 hole 0.25
via 4.634,1.699 diameter 0.4 hole 0.25
via 0.001,-5.67 diameter 0.4 hole 0.25
via 8.11,-2.056 diameter 0.4 hole 0.25
via -3.724,1.617 diameter 0.4 hole 0.25
via -6.207,0.181 diameter 0.4 hole 0.25
via 4.055,0.458 diameter 0.4 hole 0.25
via 2.317,0.736 diameter 0.4 hole 0.25
via -6.207,-2.219 diameter 0.4 hole 0.25
via 5.214,-4.26 diameter 0.4 hole 0.25
via 1.738,2.695 diameter 0.4 hole 0.25
via 6.372,5.422 diameter 0.4 hole 0.25
via 2.896,1.177 diameter 0.4 hole 0.25
via 5.214,-8.26 diameter 0.4 hole 0.25
via 6.939,6.642 diameter 0.4 hole 0.25
via -6.207,-3.019 diameter 0.4 hole 0.25
via 1.738,3.495 diameter 0.4 hole 0.25
via 4.055,-8.342 diameter 0.4 hole 0.25
via -6.828,1.422 diameter 0.4 hole 0.25
via -3.724,0.817 diameter 0.4 hole 0.25
via -0.621,-6.033 diameter 0.4 hole 0.25
via 8.11,-1.256 diameter 0.4 hole 0.25
via -1.242,7.854 diameter 0.4 hole 0.25
via 2.317,-8.864 diameter 0.4 hole 0.25
via -6.828,-0.178 diameter 0.4 hole 0.25
via 4.634,2.499 diameter 0.4 hole 0.25
via 0.001,-7.27 diameter 0.4 hole 0.25
via 8.69,0.785 diameter 0.4 hole 0.25
via -2.483,7.136 diameter 0.4 hole 0.25
via -1.862,9.006 diameter 0.4 hole 0.25
via 4.055,-9.142 diameter 0.4 hole 0.25
via -6.828,-0.978 diameter 0.4 hole 0.25
via 3.476,1.617 diameter 0.4 hole 0.25
via -3.104,3.577 diameter 0.4 hole 0.25
via 0.001,-4.07 diameter 0.4 hole 0.25
via 9.269,-3.574 diameter 0.4 hole 0.25
via -6.828,0.622 diameter 0.4 hole 0.25
via 5.214,3.74 diameter 0.4 hole 0.25
via -0.621,-8.433 diameter 0.4 hole 0.25
via 8.69,-0.815 diameter 0.4 hole 0.25
via -3.104,8.377 diameter 0.4 hole 0.25
via -1.242,9.454 diameter 0.4 hole 0.25
via 4.634,-7.101 diameter 0.4 hole 0.25
via -6.828,-1.778 diameter 0.4 hole 0.25
via 3.476,0.817 diameter 0.4 hole 0.25
via 5.214,-6.66 diameter 0.4 hole 0.25
via 6.372,6.222 diameter 0.4 hole 0.25
via -6.828,-2.578 diameter 0.4 hole 0.25
via 1.738,1.895 diameter 0.4 hole 0.25
via 2.317,4.736 diameter 0.4 hole 0.25
via -8.069,-1.697 diameter 0.4 hole 0.25
via -0.621,-2.033 diameter 0.4 hole 0.25
via 6.372,-1.778 diameter 0.4 hole 0.25
via -4.345,-3.542 diameter 0.4 hole 0.25
via -3.724,-4.783 diameter 0.4 hole 0.25
via -2.483,-2.464 diameter 0.4 hole 0.25
via 3.476,-1.583 diameter 0.4 hole 0.25
via -4.345,-4.342 diameter 0.4 hole 0.25
via -2.483,-1.664 diameter 0.4 hole 0.25
via 4.634,7.299 diameter 0.4 hole 0.25
via -4.966,8.099 diameter 0.4 hole 0.25
via -4.345,-6.742 diameter 0.4 hole 0.25
via 4.043,8.438 diameter 0.4 hole 0.25
via 4.634,-8.701 diameter 0.4 hole 0.25
via -5.586,-3.46 diameter 0.4 hole 0.25
via -1.242,1.454 diameter 0.4 hole 0.25
via 5.214,5.34 diameter 0.4 hole 0.25
via -5.586,-4.26 diameter 0.4 hole 0.25
via -1.862,-0.594 diameter 0.4 hole 0.25
via 2.317,7.936 diameter 0.4 hole 0.25
via 8.11,-4.456 diameter 0.4 hole 0.25
via -8.069,3.103 diameter 0.4 hole 0.25
via -1.242,-4.946 diameter 0.4 hole 0.25
via -3.724,3.217 diameter 0.4 hole 0.25
via -7.448,-5.337 diameter 0.4 hole 0.25
via -2.483,-7.264 diameter 0.4 hole 0.25
via -3.724,8.017 diameter 0.4 hole 0.25
via 5.754,-7.791 diameter 0.4 hole 0.25
via -6.207,0.981 diameter 0.4 hole 0.25
via 5.793,3.381 diameter 0.4 hole 0.25
via -6.828,-4.178 diameter 0.4 hole 0.25
via -3.104,0.377 diameter 0.4 hole 0.25
via 5.793,4.981 diameter 0.4 hole 0.25
via 8.11,-2.856 diameter 0.4 hole 0.25
via -9.31,3.185 diameter 0.4 hole 0.25
via -2.483,2.336 diameter 0.4 hole 0.25
via -0.621,-5.233 diameter 0.4 hole 0.25
via -1.242,-6.546 diameter 0.4 hole 0.25
via -3.724,7.217 diameter 0.4 hole 0.25
via 5.214,-7.46 diameter 0.4 hole 0.25
via -9.31,1.585 diameter 0.4 hole 0.25
via 5.793,2.581 diameter 0.4 hole 0.25
via 2.317,3.136 diameter 0.4 hole 0.25
via 1.738,-7.705 diameter 0.4 hole 0.25
via -8.69,1.944 diameter 0.4 hole 0.25
via 2.896,-4.423 diameter 0.4 hole 0.25
via 0.001,-0.07 diameter 0.4 hole 0.25
via 4.055,2.858 diameter 0.4 hole 0.25
via -6.207,-6.219 diameter 0.4 hole 0.25
via -4.345,-1.142 diameter 0.4 hole 0.25
via 0.001,-0.87 diameter 0.4 hole 0.25
via 6.372,3.822 diameter 0.4 hole 0.25
via -4.966,-3.901 diameter 0.4 hole 0.25
via -4.345,-5.942 diameter 0.4 hole 0.25
via 2.896,5.977 diameter 0.4 hole 0.25
via 5.214,-5.86 diameter 0.4 hole 0.25
via -9.31,-0.815 diameter 0.4 hole 0.25
via 3.476,7.217 diameter 0.4 hole 0.25
via 8.69,-3.215 diameter 0.4 hole 0.25
via -8.69,3.544 diameter 0.4 hole 0.25
via 8.69,-1.615 diameter 0.4 hole 0.25
via -1.862,-4.594 diameter 0.4 hole 0.25
via 1.158,3.854 diameter 0.4 hole 0.25
via -8.069,-4.897 diameter 0.4 hole 0.25
via -2.483,-6.464 diameter 0.4 hole 0.25
via -3.104,7.577 diameter 0.4 hole 0.25
via -5.586,-1.86 diameter 0.4 hole 0.25
via 5.214,2.94 diameter 0.4 hole 0.25
via 2.317,7.136 diameter 0.4 hole 0.25
via 1.738,-6.905 diameter 0.4 hole 0.25
via -9.31,2.385 diameter 0.4 hole 0.25
via -2.483,-0.064 diameter 0.4 hole 0.25
via 2.317,-4.064 diameter 0.4 hole 0.25
via 4.055,4.458 diameter 0.4 hole 0.25
via -5.586,-6.66 diameter 0.4 hole 0.25
via -4.345,-0.342 diameter 0.4 hole 0.25
via 0.579,-0.433 diameter 0.4 hole 0.25
via 6.372,1.422 diameter 0.4 hole 0.25
via -8.69,-1.256 diameter 0.4 hole 0.25
via -4.345,-5.142 diameter 0.4 hole 0.25
via -1.862,-2.194 diameter 0.4 hole 0.25
via 3.476,-0.783 diameter 0.4 hole 0.25
via -8.069,-4.097 diameter 0.4 hole 0.25
via -4.345,-7.542 diameter 0.4 hole 0.25
via 1.738,-1.305 diameter 0.4 hole 0.25
via 2.317,-1.664 diameter 0.4 hole 0.25
via 2.896,-8.423 diameter 0.4 hole 0.25
via -8.69,4.344 diameter 0.4 hole 0.25
via -2.483,-5.664 diameter 0.4 hole 0.25
via 1.158,6.254 diameter 0.4 hole 0.25
via -6.207,-5.419 diameter 0.4 hole 0.25
via -4.966,-7.101 diameter 0.4 hole 0.25
via -4.966,-3.101 diameter 0.4 hole 0.25
via -3.104,5.977 diameter 0.4 hole 0.25
via 1.158,9.454 diameter 0.4 hole 0.25
via -8.069,-0.097 diameter 0.4 hole 0.25
via 4.634,-3.901 diameter 0.4 hole 0.25
via 3.476,5.617 diameter 0.4 hole 0.25
via -7.448,1.063 diameter 0.4 hole 0.25
via 3.476,-2.383 diameter 0.4 hole 0.25
via 5.214,0.54 diameter 0.4 hole 0.25
via -1.185,-8.885 diameter 0.4 hole 0.25
via -3.724,-7.183 diameter 0.4 hole 0.25
via -4.966,2.499 diameter 0.4 hole 0.25
via -1.862,4.206 diameter 0.4 hole 0.25
via 2.317,8.736 diameter 0.4 hole 0.25
via -8.69,-2.056 diameter 0.4 hole 0.25
via -4.966,-5.501 diameter 0.4 hole 0.25
via -1.242,-0.946 diameter 0.4 hole 0.25
via 5.754,-6.191 diameter 0.4 hole 0.25
via -8.069,-2.497 diameter 0.4 hole 0.25
via 0.001,-2.47 diameter 0.4 hole 0.25
via 6.372,-0.978 diameter 0.4 hole 0.25
via -8.069,1.503 diameter 0.4 hole 0.25
via 3.476,-3.983 diameter 0.4 hole 0.25
via 5.793,0.981 diameter 0.4 hole 0.25
via -1.242,-8.146 diameter 0.4 hole 0.25
via -4.966,4.099 diameter 0.4 hole 0.25
via -2.483,4.736 diameter 0.4 hole 0.25
via 0.007,8.676 diameter 0.4 hole 0.25
via 0.579,-8.433 diameter 0.4 hole 0.25
via 6.952,-2.137 diameter 0.4 hole 0.25
via -1.862,1.806 diameter 0.4 hole 0.25
via 2.896,-6.023 diameter 0.4 hole 0.25
via -9.31,3.985 diameter 0.4 hole 0.25
via 1.158,1.454 diameter 0.4 hole 0.25
via 5.214,6.14 diameter 0.4 hole 0.25
via -1.803,-9.298 diameter 0.4 hole 0.25
via -1.862,1.006 diameter 0.4 hole 0.25
via -5.586,6.94 diameter 0.4 hole 0.25
via -7.448,-6.137 diameter 0.4 hole 0.25
via -1.862,-6.994 diameter 0.4 hole 0.25
via -3.104,6.777 diameter 0.4 hole 0.25
via 5.754,-6.991 diameter 0.4 hole 0.25
via -8.069,0.703 diameter 0.4 hole 0.25
via 5.214,2.14 diameter 0.4 hole 0.25
via -5.586,-5.86 diameter 0.4 hole 0.25
via -7.448,-2.137 diameter 0.4 hole 0.25
via -0.621,-0.433 diameter 0.4 hole 0.25
via 6.372,4.622 diameter 0.4 hole 0.25
via 2.896,7.577 diameter 0.4 hole 0.25
via -3.724,-7.983 diameter 0.4 hole 0.25
via 1.738,-5.305 diameter 0.4 hole 0.25
via 2.317,-3.264 diameter 0.4 hole 0.25
via 2.317,-0.864 diameter 0.4 hole 0.25
via 4.055,6.058 diameter 0.4 hole 0.25
via 5.189,8.499 diameter 0.4 hole 0.25
via -9.31,-4.015 diameter 0.4 hole 0.25
via -4.966,-6.301 diameter 0.4 hole 0.25
via -4.966,7.299 diameter 0.4 hole 0.25
via 3.476,8.017 diameter 0.4 hole 0.25
via 0.502,-9.33 diameter 0.4 hole 0.25
via -6.207,-3.819 diameter 0.4 hole 0.25
via -0.621,0.367 diameter 0.4 hole 0.25
via 5.793,4.181 diameter 0.4 hole 0.25
via 4.634,6.499 diameter 0.4 hole 0.25
via -7.448,-0.537 diameter 0.4 hole 0.25
via 4.055,-4.342 diameter 0.4 hole 0.25
via -3.104,-9.223 diameter 0.4 hole 0.25
via -4.966,-1.501 diameter 0.4 hole 0.25
via 2.896,5.177 diameter 0.4 hole 0.25
via -9.31,0.785 diameter 0.4 hole 0.25
via 4.634,-3.101 diameter 0.4 hole 0.25
via 5.214,-0.26 diameter 0.4 hole 0.25
via -4.342,-9.195 diameter 0.4 hole 0.25
via -1.862,-8.594 diameter 0.4 hole 0.25
via -4.966,6.499 diameter 0.4 hole 0.25
via -3.724,4.017 diameter 0.4 hole 0.25
via 1.738,9.095 diameter 0.4 hole 0.25
via 6.334,-6.55 diameter 0.4 hole 0.25
via -8.069,-3.297 diameter 0.4 hole 0.25
via -4.345,-8.342 diameter 0.4 hole 0.25
via 1.738,-2.105 diameter 0.4 hole 0.25
via 2.317,1.536 diameter 0.4 hole 0.25
via -6.828,-3.378 diameter 0.4 hole 0.25
via 5.214,-3.46 diameter 0.4 hole 0.25
via 1.738,4.295 diameter 0.4 hole 0.25
via -8.69,1.144 diameter 0.4 hole 0.25
via 4.634,-2.301 diameter 0.4 hole 0.25
via 5.214,1.34 diameter 0.4 hole 0.25
via -8.69,-4.456 diameter 0.4 hole 0.25
via -1.862,-7.794 diameter 0.4 hole 0.25
via -4.966,4.899 diameter 0.4 hole 0.25
via -3.104,4.377 diameter 0.4 hole 0.25
via 1.158,8.654 diameter 0.4 hole 0.25
via -6.828,-6.578 diameter 0.4 hole 0.25
via -7.448,-1.337 diameter 0.4 hole 0.25
via 0.001,-1.67 diameter 0.4 hole 0.25
via 6.372,2.222 diameter 0.4 hole 0.25
via -6.828,-4.978 diameter 0.4 hole 0.25
via -9.31,-1.615 diameter 0.4 hole 0.25
via -2.483,-0.864 diameter 0.4 hole 0.25
via 2.896,8.377 diameter 0.4 hole 0.25
via 5.793,5.781 diameter 0.4 hole 0.25
via -0.657,-9.258 diameter 0.4 hole 0.25
via -2.483,0.736 diameter 0.4 hole 0.25
via -6.207,6.581 diameter 0.4 hole 0.25
via -4.966,-0.701 diameter 0.4 hole 0.25
via 3.476,3.217 diameter 0.4 hole 0.25
via -6.207,-4.619 diameter 0.4 hole 0.25
via 3.451,9.577 diameter 0.4 hole 0.25
via 2.317,6.336 diameter 0.4 hole 0.25
via -2.483,-3.264 diameter 0.4 hole 0.25
via -8.69,2.744 diameter 0.4 hole 0.25
via -3.104,-4.423 diameter 0.4 hole 0.25
via -1.242,-0.146 diameter 0.4 hole 0.25
via 5.793,-1.419 diameter 0.4 hole 0.25
via 1.738,1.095 diameter 0.4 hole 0.25
via 2.317,3.936 diameter 0.4 hole 0.25
via -7.448,-4.537 diameter 0.4 hole 0.25
via -1.242,-7.346 diameter 0.4 hole 0.25
via -3.724,4.817 diameter 0.4 hole 0.25
via -8.69,0.344 diameter 0.4 hole 0.25
via 4.055,-1.942 diameter 0.4 hole 0.25
via 5.793,1.781 diameter 0.4 hole 0.25
via 6.372,-0.178 diameter 0.4 hole 0.25
via -0.621,-1.233 diameter 0.4 hole 0.25
via -8.069,-0.897 diameter 0.4 hole 0.25
via -6.828,-5.778 diameter 0.4 hole 0.25
via -4.966,-7.901 diameter 0.4 hole 0.25
via 1.738,-2.905 diameter 0.4 hole 0.25
via 2.896,-2.023 diameter 0.4 hole 0.25
via 4.055,6.858 diameter 0.4 hole 0.25
via -3.104,-8.423 diameter 0.4 hole 0.25
via -5.586,-5.06 diameter 0.4 hole 0.25
via -4.966,0.099 diameter 0.4 hole 0.25
via -3.724,5.617 diameter 0.4 hole 0.25
via 2.305,9.515 diameter 0.4 hole 0.25
via -8.69,-0.456 diameter 0.4 hole 0.25
via 4.055,-3.542 diameter 0.4 hole 0.25
via 3.476,6.417 diameter 0.4 hole 0.25
via -8.69,-2.856 diameter 0.4 hole 0.25
via -3.724,-3.183 diameter 0.4 hole 0.25
via -1.242,-1.746 diameter 0.4 hole 0.25
via 2.317,-8.064 diameter 0.4 hole 0.25
via -8.127,5.479 diameter 0.4 hole 0.25
via -1.242,-5.746 diameter 0.4 hole 0.25
via 1.158,3.054 diameter 0.4 hole 0.25
via -7.448,-3.737 diameter 0.4 hole 0.25
via -5.584,-7.513 diameter 0.4 hole 0.25
via 1.738,-0.505 diameter 0.4 hole 0.25
via 2.896,-1.223 diameter 0.4 hole 0.25
via -6.204,-7.073 diameter 0.4 hole 0.25
via -2.483,-8.864 diameter 0.4 hole 0.25
via -4.966,5.699 diameter 0.4 hole 0.25
via -3.724,6.417 diameter 0.4 hole 0.25
via 2.884,9.156 diameter 0.4 hole 0.25
via -9.31,-0.015 diameter 0.4 hole 0.25
via 3.476,-3.183 diameter 0.4 hole 0.25
via 4.634,4.099 diameter 0.4 hole 0.25
via 1.158,-5.746 diameter 0.4 hole 0.25
via 6.952,3.463 diameter 0.4 hole 0.25
via -1.862,3.406 diameter 0.4 hole 0.25
via 7.531,3.903 diameter 0.4 hole 0.25
via -3.104,-5.223 diameter 0.4 hole 0.25
via 6.952,-4.537 diameter 0.4 hole 0.25
via -4.345,2.858 diameter 0.4 hole 0.25
via -1.242,5.454 diameter 0.4 hole 0.25
via 6.952,-3.737 diameter 0.4 hole 0.25
via -4.966,0.899 diameter 0.4 hole 0.25
via 3.476,4.017 diameter 0.4 hole 0.25
via -3.104,-6.023 diameter 0.4 hole 0.25
via 4.609,8.858 diameter 0.4 hole 0.25
via 4.622,8.079 diameter 0.4 hole 0.25
via 0.592,9.034 diameter 0.4 hole 0.25
via -3.104,5.177 diameter 0.4 hole 0.25
via -4.966,1.699 diameter 0.4 hole 0.25
via -3.104,-7.623 diameter 0.4 hole 0.25
via -2.483,-8.064 diameter 0.4 hole 0.25
via -7.448,0.263 diameter 0.4 hole 0.25
via 5.793,0.181 diameter 0.4 hole 0.25
via 4.055,-2.742 diameter 0.4 hole 0.25
via 6.372,-5.778 diameter 0.4 hole 0.25
via -3.724,-8.783 diameter 0.4 hole 0.25
via -7.448,-2.937 diameter 0.4 hole 0.25
via -0.621,-2.833 diameter 0.4 hole 0.25
via -9.31,-2.415 diameter 0.4 hole 0.25
via -3.724,-2.383 diameter 0.4 hole 0.25
via -1.862,-1.394 diameter 0.4 hole 0.25
via -4.966,-2.301 diameter 0.4 hole 0.25
via 3.476,4.817 diameter 0.4 hole 0.25
via -8.69,-3.656 diameter 0.4 hole 0.25
via -3.724,-6.383 diameter 0.4 hole 0.25
via 3.463,8.797 diameter 0.4 hole 0.25
via 2.896,-7.623 diameter 0.4 hole 0.25
via -7.448,5.863 diameter 0.4 hole 0.25
via -1.862,-3.794 diameter 0.4 hole 0.25
via -0.621,7.567 diameter 0.4 hole 0.25
via -4.966,3.299 diameter 0.4 hole 0.25
via 4.634,3.299 diameter 0.4 hole 0.25
via -9.31,-3.215 diameter 0.4 hole 0.25
via -4.966,-4.701 diameter 0.4 hole 0.25
via -3.104,-6.823 diameter 0.4 hole 0.25
via 2.317,5.536 diameter 0.4 hole 0.25
via 4.03,9.217 diameter 0.4 hole 0.25
Top Overlay:
  circle w0.2: c0.007,0.1 r12.7

## USB-A-贴片 [mm]
pads (8):
  rect 3x4.2 smd: 0(-7.5,-0.5) 0(7.5,-0.5)
  round 2 hole 1.5: 0(-2.25,-2.2) 0(2.25,-2.2)
  rect 0.75x3 smd: 1(-3.5,2.2) 2(-1,2.2) 3(1,2.2) 4(3.5,2.2)
Top Overlay:
  lines w0.3: 7,1.667 -7,1.667 -6.985,1.667 -6.985,-12.278 7.01,-12.278 7.01,-10.964 7.01,-10.525 7.01,1.641
  text "V" at -3.708,3.953 h0.5
  text "D-" at -1.321,3.953 h0.5
  text "D+" at 0.686,3.953 h0.5
  text "G" at 3.226,3.953 h0.5

## Via_Pad [mm]
pads (1):
  round 2 hole 1.5 paste-2539.97 mask+0.051: 1(0,0)

## VQFN-48_L7.0-W7.0-P0.50-TL-EP5.2 [mm]
pads (49):
  oval 0.79x0.28 smd mask+0.051: 1(-3.407,2.75) 2(-3.407,2.25) 3(-3.407,1.75) 4(-3.407,1.25) 5(-3.407,0.75) 6(-3.407,0.25) 7(-3.407,-0.25) 8(-3.407,-0.75) 9(-3.407,-1.25) 10(-3.407,-1.75) 11(-3.407,-2.25) 12(-3.407,-2.75) 25(3.407,-2.75) 26(3.407,-2.25) 27(3.407,-1.75) 28(3.407,-1.25) 29(3.407,-0.75) 30(3.407,-0.25) 31(3.407,0.25) 32(3.407,0.75) 33(3.407,1.25) 34(3.407,1.75) 35(3.407,2.25) 36(3.407,2.75)
  oval 0.28x0.79 smd mask+0.051: 13(-2.75,-3.407) 14(-2.25,-3.407) 15(-1.75,-3.407) 16(-1.25,-3.407) 17(-0.75,-3.407) 18(-0.25,-3.407) 19(0.25,-3.407) 20(0.75,-3.407) 21(1.25,-3.407) 22(1.75,-3.407) 23(2.25,-3.407) 24(2.75,-3.407) 37(2.75,3.407) 38(2.25,3.407) 39(1.75,3.407) 40(1.25,3.407) 41(0.75,3.407) 42(0.25,3.407) 43(-0.25,3.407) 44(-0.75,3.407) 45(-1.25,3.407) 46(-1.75,3.407) 47(-2.25,3.407) 48(-2.75,3.407)
  rect 5.15x5.15 smd mask+0.051: 49(0,0)
Top Overlay:
  circle w0.25: c-4.064,3.302 r0.125
  region: -3.042,3.576 -3.576,3.042 -3.576,3.576
  lines w0.152: -3.576,-3.042 -3.576,-3.576 -3.042,-3.576 ; -3.576,3.042 -3.576,3.576 -3.042,3.576 ; -3.549,3.069 -3.069,3.549 ; 3.042,-3.576 3.576,-3.576 3.576,-3.042 ; 3.042,3.576 3.576,3.576 3.576,3.042
Mechanical 6:
  circle w0.25: c-4.064,3.302 r0.125
  region: -3.042,3.576 -3.576,3.042 -3.576,3.576
Mechanical 15:
  drawing of 54 lines, arcs and shapes, not listed

## VQFN-48_L7.0-W7.0-P0.50-TL-EP5.2 - duplicate [mm]
pads (49):
  oval 0.79x0.28 smd mask+0.051: 1(-3.407,2.75) 2(-3.407,2.25) 3(-3.407,1.75) 4(-3.407,1.25) 5(-3.407,0.75) 6(-3.407,0.25) 7(-3.407,-0.25) 8(-3.407,-0.75) 9(-3.407,-1.25) 10(-3.407,-1.75) 11(-3.407,-2.25) 12(-3.407,-2.75) 25(3.407,-2.75) 26(3.407,-2.25) 27(3.407,-1.75) 28(3.407,-1.25) 29(3.407,-0.75) 30(3.407,-0.25) 31(3.407,0.25) 32(3.407,0.75) 33(3.407,1.25) 34(3.407,1.75) 35(3.407,2.25) 36(3.407,2.75)
  oval 0.28x0.79 smd mask+0.051: 13(-2.75,-3.407) 14(-2.25,-3.407) 15(-1.75,-3.407) 16(-1.25,-3.407) 17(-0.75,-3.407) 18(-0.25,-3.407) 19(0.25,-3.407) 20(0.75,-3.407) 21(1.25,-3.407) 22(1.75,-3.407) 23(2.25,-3.407) 24(2.75,-3.407) 37(2.75,3.407) 38(2.25,3.407) 39(1.75,3.407) 40(1.25,3.407) 41(0.75,3.407) 42(0.25,3.407) 43(-0.25,3.407) 44(-0.75,3.407) 45(-1.25,3.407) 46(-1.75,3.407) 47(-2.25,3.407) 48(-2.75,3.407)
  rect 5.15x5.15 smd mask+0.051: 49(0,0)
Top Overlay:
  circle w0.25: c-4.064,3.302 r0.125
  region: -3.042,3.576 -3.576,3.042 -3.576,3.576
  lines w0.152: -3.576,-3.042 -3.576,-3.576 -3.042,-3.576 ; -3.576,3.042 -3.576,3.576 -3.042,3.576 ; -3.549,3.069 -3.069,3.549 ; 3.042,-3.576 3.576,-3.576 3.576,-3.042 ; 3.042,3.576 3.576,3.576 3.576,3.042
Mechanical 6:
  circle w0.25: c-4.064,3.302 r0.125
  region: -3.042,3.576 -3.576,3.042 -3.576,3.576
Mechanical 15:
  drawing of 54 lines, arcs and shapes, not listed

## W5500_V2 [mm]
pads (12):
  round 1.8 hole 1 paste-2539.97 mask+0.051: 1(0,0) 2(0,-2.54) 3(0,-5.08) 4(0,-7.62) 5(0,-10.16) 8(19.558,-10.16) 9(19.558,-7.62) 10(19.558,-5.08) 11(19.558,-2.54) 12(19.558,0)
  rect 1.8x1.8 hole 1 paste-2539.97 mask+0.051: 6(0,-12.7) 7(19.558,-12.7)
Top Overlay:
  lines w0.15: -2.131,-16.124 0.917,-19.172 18.837,-19.172 21.885,-16.124 21.885,7.879 -2.131,7.879 -2.131,-16.124
  lines w0.254: -1.423,-11.436 1.377,-11.436 ; 18.123,-11.436 20.923,-11.436 ; -1.423,-13.976 -1.423,1.264 1.377,1.264 1.377,-13.976 -1.423,-13.976 ; 18.123,-13.976 18.123,1.264 20.923,1.264 20.923,-13.976 18.123,-13.976
Mechanical 6:
  lines w0.013: -0.923,-13.506 -0.923,-11.906 0.877,-11.906 0.877,-13.506 -0.923,-13.506 ; -0.123,-10.966 cw(c-0.123,-10.166) -0.123,-9.366 0.077,-9.366 cw(c0.077,-10.166) 0.077,-10.966 -0.123,-10.966 ; -0.123,-8.426 cw(c-0.123,-7.626) -0.123,-6.826 0.077,-6.826 cw(c0.077,-7.626) 0.077,-8.426 -0.123,-8.426 ; -0.123,-5.886 cw(c-0.123,-5.086) -0.123,-4.286 0.077,-4.286 cw(c0.077,-5.086) 0.077,-5.886 -0.123,-5.886 ; -0.123,-3.346 cw(c-0.123,-2.546) -0.123,-1.746 0.077,-1.746 cw(c0.077,-2.546) 0.077,-3.346 -0.123,-3.346 ; -0.123,-0.806 cw(c-0.123,-0.006) -0.123,0.794 0.077,0.794 cw(c0.077,-0.006) 0.077,-0.806 -0.123,-0.806 ; 18.623,-13.506 18.623,-11.906 20.423,-11.906 20.423,-13.506 18.623,-13.506 ; 19.423,-10.966 cw(c19.423,-10.166) 19.423,-9.366 19.623,-9.366 cw(c19.623,-10.166) 19.623,-10.966 19.423,-10.966 ; 19.423,-8.426 cw(c19.423,-7.626) 19.423,-6.826 19.623,-6.826 cw(c19.623,-7.626) 19.623,-8.426 19.423,-8.426 ; 19.423,-5.886 cw(c19.423,-5.086) 19.423,-4.286 19.623,-4.286 cw(c19.623,-5.086) 19.623,-5.886 19.423,-5.886 ; 19.423,-3.346 cw(c19.423,-2.546) 19.423,-1.746 19.623,-1.746 cw(c19.623,-2.546) 19.623,-3.346 19.423,-3.346 ; 19.423,-0.806 cw(c19.423,-0.006) 19.423,0.794 19.623,0.794 cw(c19.623,-0.006) 19.623,-0.806 19.423,-0.806